# Altium integrated library 3522-2.IntLib: 1 symbol
Pins are listed as number, name and electrical type; pins without a type are passive.

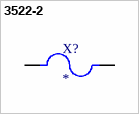
[diagram p0: symbol 3522-2]

## 3522-2
designator X?
MF: {'manufacturer': u'Keystone Electronics'}; MP: 3522-2; Availability: Unavailable; Price: None; Value: *; Package: None
footprint FUSE_3522-2
pins: 1A 1, 1B 1, 2A 2, 2B 2